# Altium footprint library Other.PcbLib: 67 footprints (part 1 of 5)
Each footprint in its own frame and in the unit in brackets; x right, y up, seen from the top. Pads: shape width x height; smd on the part's side, far side on the other; paste and mask are expansions set on the pad; w line width, h text height; cw(c..) or ccw(c..) is an arc to the next point about the centre after c.
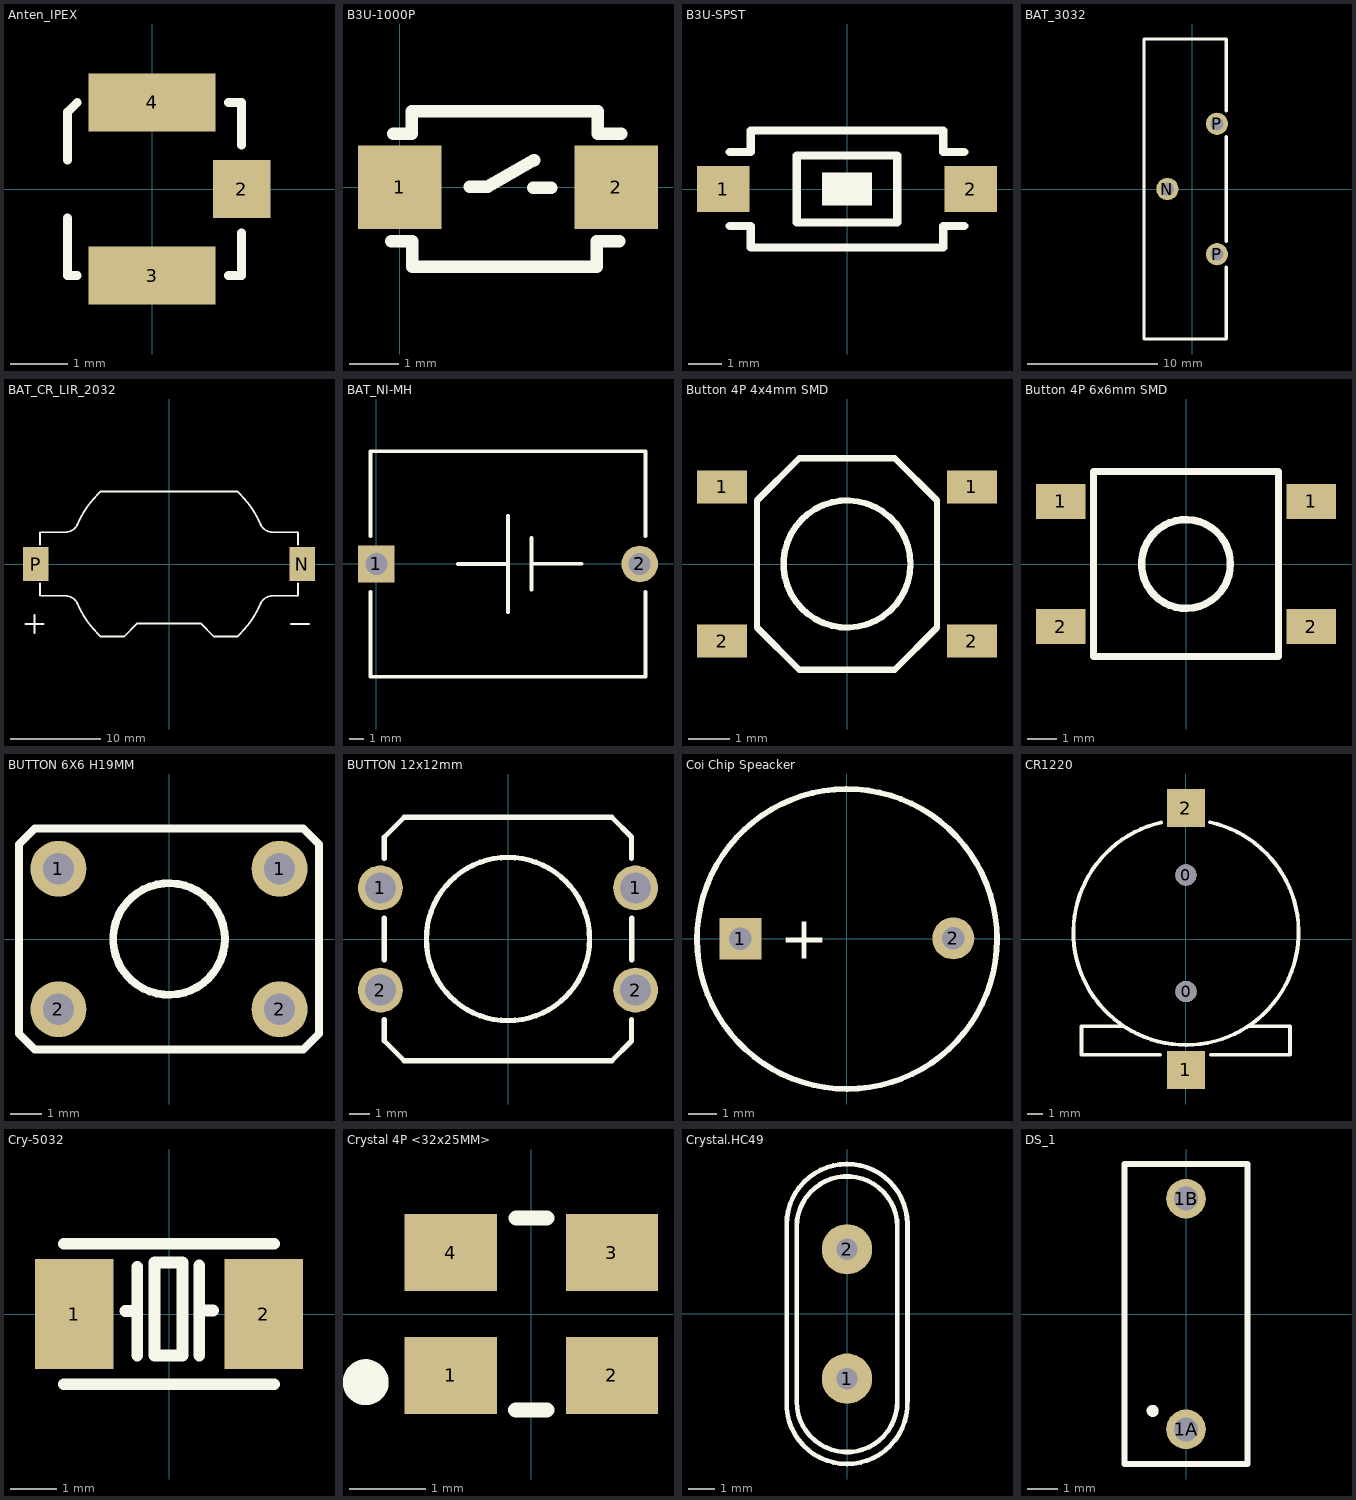
[diagram p0: the footprints below, top view; thin cyan lines are the x and y axes]

## Anten_IPEX [mm]
pads (3):
  rect 1x1 smd: 2(1.55,0)
  rect 2.2x1 smd: 3(0,-1.5) 4(0,1.5)
Top Overlay:
  lines w0.152: -1.467,-0.5 -1.467,-1.5 -1.3,-1.5 ; -1.467,0.5 -1.467,1.333 -1.3,1.5 ; 1.321,-1.5 1.55,-1.5 1.55,-0.762 ; 1.321,1.5 1.55,1.5 1.55,0.762
3D body "SMD_COAX_4MM.step": height 1.34, standoff 0, extent -1.3,-1.5 1.55,1.5

## B3U-1000P [mm] "Micro button 3*4*2mm"
pads (2):
  rect 1.7x1.7 smd: 1(0,0) 2(4.4,0)
Top Overlay:
  lines w0.254: -0.173,-1.092 0.258,-1.092 0.258,-1.619 4.002,-1.619 4.002,-1.092 4.462,-1.092 ; -0.135,1.092 0.239,1.092 0.239,1.552 4.022,1.552 4.022,1.092 4.5,1.092 ; 1.422,0.017 1.789,0.017 2.729,0.553 ; 2.715,-0.008 3.082,-0.008
3D body "User Library-Pushbutton3x4x2.STEP": height 2.01, standoff 0.01, extent -0.276,-1.485 4.624,1.415

## B3U-SPST [mm] "Micro button 3*4*2mm"
pads (2):
  rect 1.6x1.4 smd: 1(-3.754,0) 2(3.754,0)
Top Overlay:
  rectangle: -0.762,-0.508 0.762,0.508
  lines w0.254: -3.556,-1.124 -2.921,-1.124 -2.921,-1.778 0,-1.778 2.921,-1.778 2.921,-1.124 3.556,-1.124 ; -3.556,1.124 -2.921,1.124 -2.921,1.778 0,1.778 2.921,1.778 2.921,1.124 3.556,1.124 ; -1.524,-1.016 -1.524,1.016 1.524,1.016 1.524,-1.016 -1.524,-1.016
3D body "Tactile Switch SMD 6x3.6mm H=2.5mm RS-282G05A3-SM RT.stp": height 2.5, standoff -0.02, extent -4,-1.8 4,1.8

## BAT_3032 [mm]
height 5.6
pads (3):
  round 1.7 hole 1: N(-1.9,0) P(1.9,-5) P(1.9,5)
Top Overlay:
  lines w0.254: 2.6,-5.999 2.6,-11.499 -3.7,-11.499 -3.7,11.499 2.6,11.499 2.6,5.999 ; 2.6,-4 2.6,4
3D body "Cr2032v.stp": height 25.5, standoff -1, extent -3.7,-11.499 2.6,11.499

## BAT_CR_LIR_2032 [mm]
height 5.6
pads (2):
  rect 2.8x3.7 smd: N(14.7,0) P(-14.7,0)
Top Overlay:
  lines w0.203: -15.825,-6.604 -13.825,-6.604 ; -14.825,-7.604 -14.825,-5.604 ; -14.25,-2.159 -14.25,-3.5 -11.456,-3.5 ; -14.25,2.159 -14.25,3.5 -11.456,3.5 ; -7.547,-8 -4.95,-8 -3.5,-6.55 3.5,-6.55 4.95,-8 7.547,-8 ; -7.547,8 7.547,8 ; 13.444,-6.604 15.444,-6.604 ; 14.25,-2.159 14.25,-3.5 11.456,-3.5 ; 14.25,2.159 14.25,3.5 11.456,3.5 ; -11.456,-3.5 cw(c-11.456,-5) -10.228,-4.14 ccw(c-11.456,-5) -11.456,-3.5 ; -11.456,3.5 ccw(c-11.456,5) -10.228,4.14 cw(c-11.456,5) -11.456,3.5 ; 11.456,-3.5 ccw(c11.456,-5) 10.228,-4.14 cw(c11.456,-5) 11.456,-3.5 ; 11.456,3.5 cw(c11.456,5) 10.228,4.14 ccw(c11.456,5) 11.456,3.5 ; -10.228,-4.139 cw(c-11.456,-5) -10.086,-4.39 ccw(c-11.456,-5) -10.228,-4.139 ; -10.228,4.139 ccw(c-11.456,5) -10.086,4.39 cw(c-11.456,5) -10.228,4.139 ; -10.113,-4.326 ccw(c-0.145,-0.095) -7.531,-8.015 cw(c-0.145,-0.095) -10.113,-4.326 ; -10.113,4.326 cw(c-0.145,0.095) -7.531,8.015 ccw(c-0.145,0.095) -10.113,4.326 ; 7.531,-8.015 ccw(c0.145,-0.095) 10.113,-4.326 cw(c0.145,-0.095) 7.531,-8.015 ; 7.531,8.015 cw(c0.145,0.095) 10.113,4.326 ccw(c0.145,0.095) 7.531,8.015 ; 10.086,-4.39 cw(c11.456,-5) 10.228,-4.139 ccw(c11.456,-5) 10.086,-4.39 ; 10.086,4.39 ccw(c11.456,5) 10.228,4.139 cw(c11.456,5) 10.086,4.39
3D body "step_temp.STEP": height 5.6, standoff 0, extent -16,-8.05 16,8.05
3D body "CR2032--3DModel-STEP-56544.STEP": height 4.9, standoff 1.7, extent -10,-10 10,10

## BAT_NI-MH [mm] "L-W-H=20x16x16"
pads (2):
  rect 2.5x2.5 hole 1.5: 1(0,0)
  round 2.5 hole 1.5: 2(18,0)
Top Overlay:
  lines w0.254: -0.4,-1.905 -0.4,-3.48 -0.4,-7.7 18.4,-7.7 18.4,-1.905 ; -0.4,1.905 -0.4,7.7 18.4,7.7 18.4,1.905 ; 5.571,0 9,0 ; 9,-3.302 9,0 ; 9,3.302 9,0 ; 10.6,-1.753 10.6,0.013 ; 10.6,1.778 10.6,0.013 ; 14.029,0.013 10.6,0.013
3D body "User Library-3_6v 60mAh Battery.STEP": height 16.34, standoff -1.85, extent -0.4,-7.7 18.4,7.7

## Button 4P 4x4mm SMD [mm] "SW SMD button 4pin"
height 2.54
pads (4):
  rect 1.2x0.8 smd: 1(-3,1.85) 1(3,1.85) 2(-3,-1.85) 2(3,-1.85)
Top Overlay:
  circle w0.152: c0,0 r1.524
  lines w0.152: -2.159,-1.524 -1.143,-2.54 1.143,-2.54 2.159,-1.524 2.159,1.524 1.143,2.54 -1.143,2.54 -2.159,1.524 -2.159,-1.524
3D body "Ts-1252_1.6.stp": height 1.65, standoff 0.05, extent -3.25,-2.6 3.25,2.6

## Button 4P 6x6mm SMD [mm] "SW SMD button 4pin, 250 x250 mil"
height 2.54
pads (4):
  rect 1.7x1.2 smd: 1(-4.3,2.15) 1(4.3,2.15) 2(-4.3,-2.15) 2(4.3,-2.15)
Top Overlay:
  circle w0.254: c0,0 r1.524
  lines w0.254: -3.175,-3.175 -3.175,3.175 3.175,3.175 3.175,-3.175 -3.175,-3.175
3D body "Push_btn_assy.stp": height 3.83, standoff 0.08, extent -5.05,-3.35 5.05,3.35

## BUTTON 6X6 H19MM [mm] "SW button 4pin 6X6"
height 2.54
pads (4):
  round 1.8 hole 1: 1(-3.556,2.261) 1(3.556,2.261) 2(-3.556,-2.261) 2(3.556,-2.261)
Top Overlay:
  circle w0.254: c0,0 r1.796
  lines w0.254: -4.826,-3.048 -4.826,3.048 -4.318,3.556 4.318,3.556 4.826,3.048 4.826,-3.048 4.318,-3.556 -4.318,-3.556 -4.826,-3.048
3D body "6X6X20_BUTTON.STEP": height 20, standoff -3.45, extent -4.101,-3 4.101,3
3D body "12mm Push Button Cap.STEP": height 21.8, standoff 13.6, extent -6.5,-6.5 6.5,6.5

## BUTTON 12x12mm [mm] "SW button 4P 12x12"
height 2.54
pads (4):
  round 2.2 hole 1.5: 1(-6.25,2.5) 1(6.25,2.5) 2(-6.25,-2.5) 2(6.25,-2.5)
Top Overlay:
  circle w0.254: c0,0 r4
  lines w0.254: -6.06,-3.937 -6.06,-4.989 -5.08,-5.969 5.08,-5.969 6.052,-4.997 6.052,-3.937 ; -6.06,-1.016 -6.06,1.016 ; -6.06,3.937 -6.06,4.989 -5.08,5.969 5.08,5.969 6.052,4.997 6.052,3.937 ; 6.06,-1.016 6.06,1.016
3D body "bouton_12x12mm.step": height 12.13, standoff -3.34, extent -7.032,-6.4 7.032,6.4

## Coi Chip Speacker [mm]
pads (2):
  rect 1.5x1.5 hole 0.8: 1(-3.81,-0.006)
  round 1.5 hole 0.8: 2(3.81,0.006)
Top Overlay:
  lines w0.203: 3.914,3.664 ccw(c0.006,-0.015) 3.95,3.626
  text "+" at -2.4,-0.718 h1.52
3D body "User Library-Buzzer WST-1203UX.step": height 3.99, standoff -10.16, extent -6,-6 9.454,6

## CR1220 [mm]
height 8.54
pads (4):
  round 1.4 hole 1.4 mask+0: 0(0,4.2) 0(0.005,-3.45)
  rect 2.5x2.5 smd: 1(0,-8.6) 2(0,8.6)
Top Overlay:
  lines w0.254: -4.194,-5.725 -6.868,-5.725 -6.868,-7.6 -1.687,-7.6 ; -1.618,7.656 ccw(c0.005,0.439) 1.585,7.665 ; 1.651,-7.6 6.833,-7.6 6.833,-5.725 4.158,-5.725
3D body "CR1220 SMD.STEP": height 4.27, standoff -0.48, extent -7.381,-9.267 7.368,9.533

## Cry-5032 [mm]
pads (2):
  rect 1.7x2.4 smd: 1(-2.06,0) 2(2.06,0)
Top Overlay:
  lines w0.254: -2.286,-1.524 2.286,-1.524 ; -2.286,1.524 2.286,1.524 ; -0.948,0.064 -0.688,0.064 ; -0.688,-0.902 -0.688,1.029 ; 0.658,-0.902 0.658,1.054 ; 0.658,0.076 0.955,0.076 ; -0.315,-0.902 0.292,-0.902 0.292,1.118 -0.315,1.118 -0.315,-0.902
3D body "User Library-ABM3-1.STEP": height 1.31, standoff 0.01, extent -2.5,-1.6 2.5,1.6

## Crystal 4P <32x25MM> [mm]
pads (4):
  rect 1.2x1 smd: 1(-1.05,-0.8) 2(1.05,-0.8) 3(1.05,0.8) 4(-1.05,0.8)
Top Overlay:
  circle w0.4: c-2.159,-0.889 r0.1
  lines w0.2: -0.201,-1.25 0.199,-1.25 ; -0.199,1.25 0.201,1.25
3D body "User Library-3225-1.step": height 0.74, standoff 0.13, extent -1.6,-1.25 1.6,1.25

## Crystal.HC49 [mm] "HC49USxx package"
height 5.08
pads (2):
  round 1.905 hole 0.8: 1(0,-2.45) 2(0,2.45)
Top Overlay:
  lines w0.178: -2.286,3.382 cw(c0,3.389) 2.286,3.404 ; -2.286,3.389 -2.286,-3.315 ccw(c-0.001,-3.392) 2.283,-3.316 ; 2.286,-3.316 2.286,3.389 ; -1.905,-3.333 ccw(c0,-3.321) 1.905,-3.315 1.905,3.315 ccw(c0,3.302) -1.905,3.297 -1.905,-3.333
3D body "SW3dPS-HP49US.STEP": height 3.63, standoff -3.87, extent -2.286,-5.675 2.364,5.675

## DS_1 [mm]
pads (2):
  round 1.308 hole 0.8: 1A(0,-3.81) 1B(0,3.81)
Top Overlay:
  circle w0.2: c-1.1,-3.2 r0.1
  lines w0.2: -2.032,-4.953 -2.032,4.953 2.032,4.953 2.032,-4.953 -2.032,-4.953
3D body "DS1040-01 (DIP_switch).stp": height 6.8, standoff -3.85, extent -2,-4.94 2,4.96